# Altium footprint library PCB_PTUController.PcbLib: 106 footprints (part 3 of 7)
Each footprint in its own frame and in the unit in brackets; x right, y up, seen from the top. Pads: shape width x height; smd on the part's side, far side on the other; paste and mask are expansions set on the pad; w line width, h text height; cw(c..) or ccw(c..) is an arc to the next point about the centre after c.
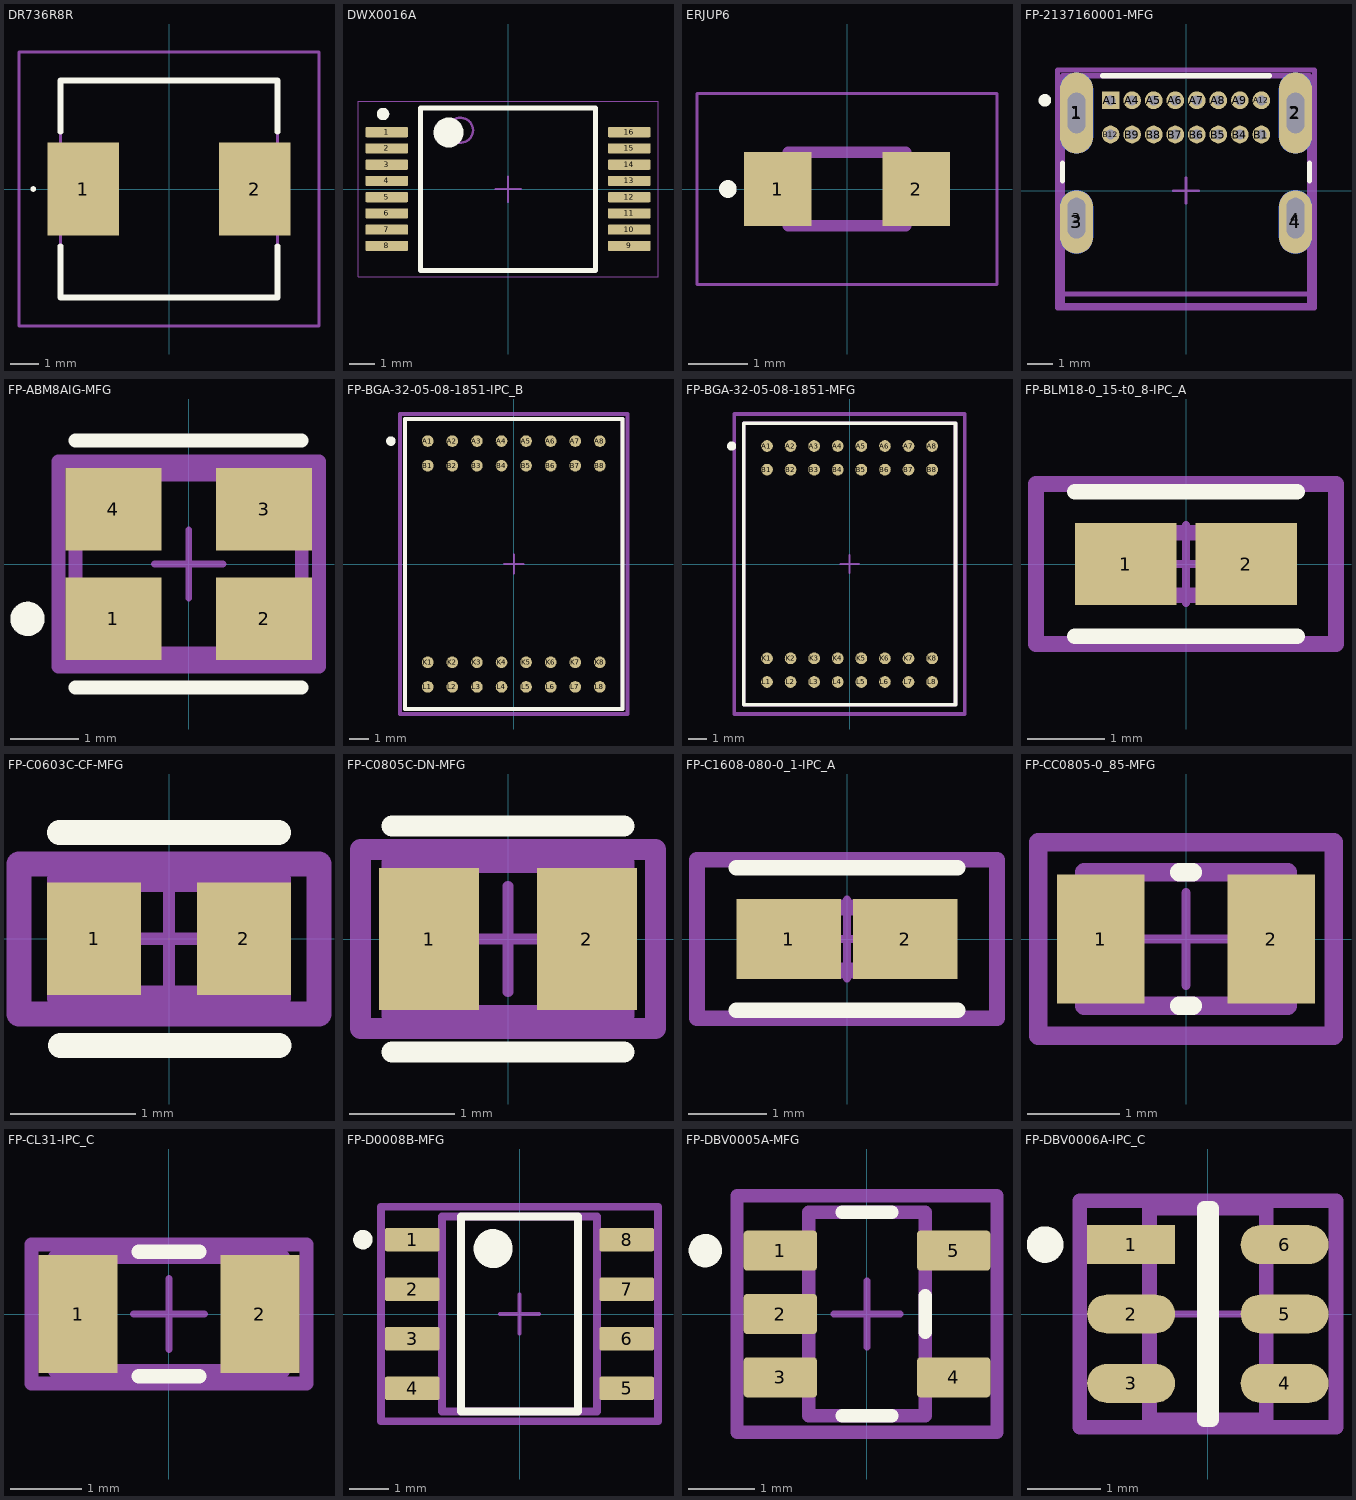
[diagram p2: the footprints below, top view; thin cyan lines are the x and y axes]

## DR736R8R [mm]
pads (2):
  rect 2.5x3.25 smd: 1(-3,0) 2(3,0)
Top Overlay:
  lines w0.1: -4.8,0 cw(c-4.75,0) -4.7,0 cw(c-4.75,0) -4.8,0
  lines w0.2: -3.8,-2 -3.8,-3.8 3.8,-3.8 3.8,-2 ; -3.8,2 -3.8,3.8 3.8,3.8 3.8,2
Top Courtyard:
  lines w0.1: -3.8,-3.8 -3.8,3.8 3.8,3.8 3.8,-3.8 -3.8,-3.8
Bottom Assembly:
  lines w0.1: -5.25,-4.8 -5.25,4.8 5.25,4.8 5.25,-4.8 -5.25,-4.8

## DWX0016A [mm]
height 2
pads (16):
  rrect22% 1.7x0.41 smd: 1(-4.85,2.275) 2(-4.85,1.625) 3(-4.85,0.975) 4(-4.85,0.325) 5(-4.85,-0.325) 6(-4.85,-0.975) 7(-4.85,-1.625) 8(-4.85,-2.275) 9(4.85,-2.275) 10(4.85,-1.625) 11(4.85,-0.975) 12(4.85,-0.325) 13(4.85,0.325) 14(4.85,0.975) 15(4.85,1.625) 16(4.85,2.275)
Top Overlay:
  circle w0.25: c-5,3 r0.125
  circle w0.6: c-2.379,2.262 r0.3
  lines w0.2: -3.5,-3.25 -3.5,3.25 3.5,3.25 3.5,-3.25 -3.5,-3.25
Mechanical 1:
  text ".Designator" at -1.651,-0.254 h1
Top 3D Body:
  circle w0.1: c-1.9,2.35 r0.5
  lines w0.1: -3.5,-3.25 -3.5,3.25 3.5,3.25 3.5,-3.25 -3.5,-3.25
Top Courtyard:
  lines w0.05: -6,-3.5 -6,3.5 6,3.5 6,-3.5 -6,-3.5
  lines w0.1: -0.5,0 0.5,0 ; 0,-0.5 0,0.5
3D body "SSOP16_DWX_TEX.step": height 2.59, standoff 0, extent -5.22,-2.972 5.22,2.972

## ERJUP6 [mm]
pads (2):
  rect 1.15x1.25 smd: 1(-1.175,0) 2(1.175,0)
Top Overlay:
  circle w0.2: c-2.025,0 r0.05
Top 3D Body:
  lines w0.2: -1,-0.625 -1,0.625 1,0.625 1,-0.625 -1,-0.625
Top Courtyard:
  lines w0.05: -2.55,-1.625 -2.55,1.625 2.55,1.625 2.55,-1.625 -2.55,-1.625
3D body "ERJ-UP6D5101V.stp": height 0.6, standoff 0, extent -1,-0.625 1,0.625

## FP-2137160001-MFG [mm]
pads (28):
  rrect100% 1.3x3.2 smd paste-1000 mask+0: 1(-4.32,3.065) 2(4.32,3.065)
  rrect100% 0.7x1.6 hole 1.6 slot 0.7 at 0 deg paste-2539.97 mask+0: 1(-4.32,3.065) 2(4.32,3.065) 3(-4.32,-1.085) 4(4.32,-1.085)
  rrect100% 1.3x3.2 smd far side paste-1000 mask+0: 1(-4.32,3.065) 2(4.32,3.065)
  rrect100% 1.3x2.5 smd paste-1000 mask+0: 3(-4.32,-1.235) 4(4.32,-1.235)
  rrect100% 1.3x2.5 smd far side paste-1000 mask+0: 3(-4.32,-1.235) 4(4.32,-1.235)
  rect 0.7x0.7 hole 0.4 paste-2539.97 mask+0: A1(-2.975,3.565)
  round 0.7 hole 0.4 paste-2539.97 mask+0: A4(-2.125,3.565) A5(-1.275,3.565) A6(-0.425,3.565) A7(0.425,3.565) A8(1.275,3.565) A9(2.125,3.565) A12(2.975,3.565) B1(2.975,2.215) B4(2.125,2.215) B5(1.275,2.215) B6(0.425,2.215) B7(-0.425,2.215) B8(-1.275,2.215) B9(-2.125,2.215) B12(-2.975,2.215)
Top Overlay:
  circle w0.25: c-5.57,3.565 r0.125
  lines w0.2: -4.87,0.39 -4.87,1.09 ; -3.295,4.535 3.295,4.535 ; 4.87,0.39 4.87,1.09
Top Assembly:
  lines w0.2: -5.07,-4.635 5.07,-4.635 5.07,4.765 -5.07,4.765 -5.07,-4.635
  text ".Designator" at 0,0.065 h1
Top 3D Body:
  lines w0.2: -5.07,-4.085 5.07,-4.085 ; -4.87,-4.535 4.87,-4.535 4.87,4.535 -4.87,4.535 -4.87,-4.535
Top Courtyard:
  lines w0.2: -5.07,-4.635 5.07,-4.635 5.07,4.765 -5.07,4.765 -5.07,-4.635
Top Component Center:
  lines w0.1: -0.5,0 0.5,0 ; 0,-0.5 0,0.5
3D body "Conn_Molex_2137160001_eec.STEP": height 0.25, standoff 0, extent -5.07,-4.635 5.07,4.765

## FP-ABM8AIG-MFG [mm]
pads (4):
  rect 1.4x1.2 smd paste+0 mask+0: 1(-1.1,-0.8) 2(1.1,-0.8) 3(1.1,0.8) 4(-1.1,0.8)
Top Overlay:
  circle w0.25: c-2.35,-0.8 r0.125
  lines w0.2: -1.65,-1.8 1.65,-1.8 ; -1.65,1.8 1.65,1.8
Top Assembly:
  lines w0.2: -1.9,-1.5 1.9,-1.5 1.9,1.5 -1.9,1.5 -1.9,-1.5
  text ".Designator" at 0,0.188 h1
Top 3D Body:
  lines w0.2: -1.65,-1.3 1.65,-1.3 1.65,1.3 -1.65,1.3 -1.65,-1.3
Top Courtyard:
  lines w0.2: -1.9,-1.5 1.9,-1.5 1.9,1.5 -1.9,1.5 -1.9,-1.5
Top Component Center:
  lines w0.1: -0.5,0 0.5,0 ; 0,-0.5 0,0.5
3D body "Crys_Abracon_ABM8AIG-20_000MHZ-12-2Z-T3_eec.STEP": height 0.25, standoff 0, extent -1.9,-1.5 1.9,1.5

## FP-BGA-32-05-08-1851-IPC_B [mm]
pads (32):
  round 0.6 smd paste-2539.97 mask+0: A1(-4.445,6.35) A2(-3.175,6.35) A3(-1.905,6.35) A4(-0.635,6.35) A5(0.635,6.35) A6(1.905,6.35) A7(3.175,6.35) A8(4.445,6.35) B1(-4.445,5.08) B2(-3.175,5.08) B3(-1.905,5.08) B4(-0.635,5.08) B5(0.635,5.08) B6(1.905,5.08) B7(3.175,5.08) B8(4.445,5.08) K1(-4.445,-5.08) K2(-3.175,-5.08) K3(-1.905,-5.08) K4(-0.635,-5.08) K5(0.635,-5.08) K6(1.905,-5.08) K7(3.175,-5.08) K8(4.445,-5.08) L1(-4.445,-6.35) L2(-3.175,-6.35) L3(-1.905,-6.35) L4(-0.635,-6.35) L5(0.635,-6.35) L6(1.905,-6.35) L7(3.175,-6.35) L8(4.445,-6.35)
Top Overlay:
  circle w0.25: c-6.35,6.35 r0.125
  lines w0.2: -5.625,-7.5 -5.625,7.5 5.625,7.5 5.625,-7.5 -5.625,-7.5
Top Assembly:
  lines w0.2: -5.875,-7.75 -5.875,7.75 5.875,7.75 5.875,-7.75 -5.875,-7.75
  text ".Designator" at 0,0 h1
Top 3D Body:
  lines w0.2: -5.625,-7.5 -5.625,7.5 5.625,7.5 5.625,-7.5 -5.625,-7.5
Top Courtyard:
  lines w0.2: -5.875,-7.75 -5.875,7.75 5.875,7.75 5.875,-7.75 -5.875,-7.75
Top Component Center:
  lines w0.1: -0.5,0 0.5,0 ; 0,-0.5 0,0.5
3D body "IC_Analog_Devices_LTM2881IY-3_eec.STEP": height 0.25, standoff 0, extent -5.875,-7.75 5.875,7.75

## FP-BGA-32-05-08-1851-MFG [mm]
pads (32):
  round 0.63 smd paste-2539.97 mask+0: A1(-4.445,6.35) A2(-3.175,6.35) A3(-1.905,6.35) A4(-0.635,6.35) A5(0.635,6.35) A6(1.905,6.35) A7(3.175,6.35) A8(4.445,6.35) B1(-4.445,5.08) B2(-3.175,5.08) B3(-1.905,5.08) B4(-0.635,5.08) B5(0.635,5.08) B6(1.905,5.08) B7(3.175,5.08) B8(4.445,5.08) K1(-4.445,-5.08) K2(-3.175,-5.08) K3(-1.905,-5.08) K4(-0.635,-5.08) K5(0.635,-5.08) K6(1.905,-5.08) K7(3.175,-5.08) K8(4.445,-5.08) L1(-4.445,-6.35) L2(-3.175,-6.35) L3(-1.905,-6.35) L4(-0.635,-6.35) L5(0.635,-6.35) L6(1.905,-6.35) L7(3.175,-6.35) L8(4.445,-6.35)
Top Overlay:
  circle w0.25: c-6.35,6.35 r0.125
  lines w0.2: -5.7,-7.575 5.7,-7.575 5.7,7.575 -5.7,7.575 -5.7,-7.575
Top Assembly:
  lines w0.2: -6.2,-8.075 6.2,-8.075 6.2,8.075 -6.2,8.075 -6.2,-8.075
  text ".Designator" at 0,0 h1
Top 3D Body:
  lines w0.2: -5.7,-7.575 5.7,-7.575 5.7,7.575 -5.7,7.575 -5.7,-7.575
Top Courtyard:
  lines w0.2: -6.2,-8.075 6.2,-8.075 6.2,8.075 -6.2,8.075 -6.2,-8.075
Top Component Center:
  lines w0.1: -0.5,0 0.5,0 ; 0,-0.5 0,0.5
3D body "IC_Analog_Devices_LTM2881IY-3_eec.STEP": height 0.25, standoff 0, extent -6.2,-8.075 6.2,8.075

## FP-BLM18-0_15-t0_8-IPC_A [mm]
pads (2):
  rect 1.306x1.058 smd paste+0 mask+0: 1(-0.776,0) 2(0.776,0)
Top Overlay:
  lines w0.2: -1.429,-0.929 1.429,-0.929 ; -1.429,0.929 1.429,0.929
Top Assembly:
  lines w0.2: -1.929,-1.029 -1.929,1.029 1.929,1.029 1.929,-1.029 -1.929,-1.029
  text ".Designator" at 0,0.188 h1
Top 3D Body:
  lines w0.2: -0.8,-0.4 -0.8,0.4 0.8,0.4 0.8,-0.4 -0.8,-0.4
Top Courtyard:
  lines w0.2: -1.929,-1.029 -1.929,1.029 1.929,1.029 1.929,-1.029 -1.929,-1.029
Top Component Center:
  lines w0.1: -0.5,0 0.5,0 ; 0,-0.5 0,0.5
3D body "FBead_Murata_BLM18EG221SN1D_eec.STEP": height 0.25, standoff 0, extent -1.929,-1.029 1.929,1.029

## FP-C0603C-CF-MFG [mm]
pads (2):
  rect 0.75x0.9 smd paste+0 mask+0: 1(-0.6,0) 2(0.6,0)
Top Overlay:
  lines w0.2: -0.875,0.85 0.875,0.85 ; -0.87,-0.853 0.88,-0.853
Top Assembly:
  lines w0.2: -1.2,-0.6 1.2,-0.6 1.2,0.6 -1.2,0.6 -1.2,-0.6
  text ".Designator" at 0,0.188 h1
Top 3D Body:
  lines w0.2: -0.875,-0.475 0.875,-0.475 0.875,0.475 -0.875,0.475 -0.875,-0.475
Top Courtyard:
  lines w0.2: -1.2,-0.6 1.2,-0.6 1.2,0.6 -1.2,0.6 -1.2,-0.6
Top Component Center:
  lines w0.1: -0.5,0 0.5,0 ; 0,-0.5 0,0.5
3D body "Cap_KEMET_C0603C272M5JACTU_eec.STEP": height 0.25, standoff 0, extent -1.2,-0.6 1.2,0.6

## FP-C0805C-DN-MFG [mm]
pads (2):
  rect 0.95x1.35 smd paste+0 mask+0: 1(-0.75,0) 2(0.75,0)
Top Overlay:
  lines w0.2: -1.1,-1.075 1.1,-1.075 ; -1.1,1.075 1.1,1.075
Top Assembly:
  lines w0.2: -1.4,-0.85 1.4,-0.85 1.4,0.85 -1.4,0.85 -1.4,-0.85
  text ".Designator" at 0,0.188 h1
Top 3D Body:
  lines w0.2: -1.1,-0.725 1.1,-0.725 1.1,0.725 -1.1,0.725 -1.1,-0.725
Top Courtyard:
  lines w0.2: -1.4,-0.85 1.4,-0.85 1.4,0.85 -1.4,0.85 -1.4,-0.85
Top Component Center:
  lines w0.1: -0.5,0 0.5,0 ; 0,-0.5 0,0.5
3D body "Cap_KEMET_C0805C472J3HAC_eec.STEP": height 0.25, standoff 0, extent -1.4,-0.85 1.4,0.85

## FP-C1608-080-0_1-IPC_A [mm]
pads (2):
  rect 1.331x1.012 smd paste+0 mask+0: 1(-0.741,0) 2(0.741,0)
Top Overlay:
  lines w0.2: -1.406,-0.906 1.406,-0.906 ; -1.406,0.906 1.406,0.906
Top Assembly:
  lines w0.2: -1.906,-1.006 1.906,-1.006 1.906,1.006 -1.906,1.006 -1.906,-1.006
  text ".Designator" at 0,0.188 h1
Top 3D Body:
  lines w0.2: -0.8,-0.4 0.8,-0.4 0.8,0.4 -0.8,0.4 -0.8,-0.4
Top Courtyard:
  lines w0.2: -1.906,-1.006 1.906,-1.006 1.906,1.006 -1.906,1.006 -1.906,-1.006
Top Component Center:
  lines w0.1: -0.5,0 0.5,0 ; 0,-0.5 0,0.5
3D body "Cap_TDK_C1608X6S0G106K080AB_eec.STEP": height 0.25, standoff 0, extent -1.906,-1.006 1.906,1.006

## FP-CC0805-0_85-MFG [mm]
pads (2):
  rect 0.95x1.4 smd paste+0 mask+0: 1(-0.925,0) 2(0.925,0)
Top Overlay:
  lines w0.2: -0.075,-0.725 0.075,-0.725 ; -0.075,0.725 0.075,0.725
Top Assembly:
  lines w0.2: -1.6,-1.05 1.6,-1.05 1.6,1.05 -1.6,1.05 -1.6,-1.05
  text ".Designator" at 0,0.188 h1
Top 3D Body:
  lines w0.2: -1.1,-0.725 1.1,-0.725 1.1,0.725 -1.1,0.725 -1.1,-0.725
Top Courtyard:
  lines w0.2: -1.6,-1.05 1.6,-1.05 1.6,1.05 -1.6,1.05 -1.6,-1.05
Top Component Center:
  lines w0.1: -0.5,0 0.5,0 ; 0,-0.5 0,0.5
3D body "Cap_Yageo_CC0805KKX7R7BB105_eec.STEP": height 0.25, standoff 0, extent -1.6,-1.05 1.6,1.05

## FP-CL31-IPC_C [mm]
pads (2):
  rect 1.105x1.658 smd paste+0 mask+0: 1(-1.276,0) 2(1.276,0)
Top Overlay:
  lines w0.2: -0.424,-0.875 0.424,-0.875 ; -0.424,0.875 0.424,0.875
Top Assembly:
  lines w0.2: -1.929,-0.975 1.929,-0.975 1.929,0.975 -1.929,0.975 -1.929,-0.975
  text ".Designator" at 0,0.188 h1
Top 3D Body:
  lines w0.2: -1.6,-0.8 1.6,-0.8 1.6,0.8 -1.6,0.8 -1.6,-0.8
Top Courtyard:
  lines w0.2: -1.929,-0.975 1.929,-0.975 1.929,0.975 -1.929,0.975 -1.929,-0.975
Top Component Center:
  lines w0.1: -0.5,0 0.5,0 ; 0,-0.5 0,0.5
3D body "Cap_Samsung_CL31B105KOFNNNE_eec.STEP": height 0.25, standoff 0, extent -1.929,-0.975 1.929,0.975

## FP-D0008B-MFG [mm]
pads (8):
  rrect17% 1.4x0.6 smd paste+0 mask+0: 1(-2.75,1.905) 2(-2.75,0.635) 3(-2.75,-0.635) 4(-2.75,-1.905) 5(2.75,-1.905) 6(2.75,-0.635) 7(2.75,0.635) 8(2.75,1.905)
Top Overlay:
  circle w0.25: c-4.015,1.905 r0.125
  circle w0.5: c-0.675,1.675 r0.25
  lines w0.2: -1.5,-2.5 1.5,-2.5 1.5,2.5 -1.5,2.5 -1.5,-2.5
Top Assembly:
  lines w0.2: -3.55,-2.75 3.55,-2.75 3.55,2.75 -3.55,2.75 -3.55,-2.75
  text ".Designator" at 0,0.188 h1
Top 3D Body:
  lines w0.2: -1.99,-2.5 1.99,-2.5 1.99,2.5 -1.99,2.5 -1.99,-2.5
Top Courtyard:
  lines w0.2: -3.55,-2.75 3.55,-2.75 3.55,2.75 -3.55,2.75 -3.55,-2.75
Top Component Center:
  lines w0.1: -0.5,0 0.5,0 ; 0,-0.5 0,0.5
3D body "IC_Texas_Instruments_ISO7710FDR_eec.STEP": height 0.25, standoff 0, extent -3.55,-2.75 3.55,2.75

## FP-DBV0005A-MFG [mm]
pads (5):
  rrect17% 1.1x0.6 smd paste+0 mask+0: 1(-1.3,0.95) 2(-1.3,0) 3(-1.3,-0.95) 4(1.3,-0.95) 5(1.3,0.95)
Top Overlay:
  circle w0.25: c-2.425,0.95 r0.125
  lines w0.2: -0.375,-1.525 0.375,-1.525 ; -0.375,1.525 0.375,1.525 ; 0.875,-0.275 0.875,0.275
Top Assembly:
  lines w0.2: -1.95,-1.775 1.95,-1.775 1.95,1.775 -1.95,1.775 -1.95,-1.775
  text ".Designator" at 0,0 h1
Top 3D Body:
  lines w0.2: -0.875,-1.525 0.875,-1.525 0.875,1.525 -0.875,1.525 -0.875,-1.525
Top Courtyard:
  lines w0.2: -1.95,-1.775 1.95,-1.775 1.95,1.775 -1.95,1.775 -1.95,-1.775
Top Component Center:
  lines w0.1: -0.5,0 0.5,0 ; 0,-0.5 0,0.5
3D body "IC_Texas_Instruments_INA180A4IDBVT_eec.STEP": height 0.25, standoff 0, extent -1.95,-1.775 1.95,1.775

## FP-DBV0006A-IPC_C [mm]
pads (6):
  rect 1.205x0.53 smd paste+0 mask+0: 1(-1.05,0.95)
  rrect100% 1.205x0.53 smd paste+0 mask+0: 2(-1.05,0) 3(-1.05,-0.95) 4(1.05,-0.95) 5(1.05,0) 6(1.05,0.95)
Top Overlay:
  circle w0.25: c-2.228,0.95 r0.125
  lines w0.2: -0.052,-1.45 -0.052,1.45 0.052,1.45 0.052,-1.45 -0.052,-1.45
Top Assembly:
  lines w0.2: -1.753,-1.55 1.753,-1.55 1.753,1.55 -1.753,1.55 -1.753,-1.55
  text ".Designator" at 0,0.188 h1
Top 3D Body:
  lines w0.2: -0.8,-1.45 0.8,-1.45 0.8,1.45 -0.8,1.45 -0.8,-1.45
Top Courtyard:
  lines w0.2: -1.753,-1.55 1.753,-1.55 1.753,1.55 -1.753,1.55 -1.753,-1.55
Top Component Center:
  lines w0.1: -0.5,0 0.5,0 ; 0,-0.5 0,0.5
3D body "IC_Texas_Instruments_SN74LVC1G97DBVR_eec.STEP": height 0.25, standoff 0, extent -1.753,-1.55 1.753,1.55